# Altium footprint library Footprint-Lib-PhilsLab.PcbLib: 544 footprints (part 11 of 34)
Each footprint in its own frame and in the unit in brackets; x right, y up, seen from the top. Pads: shape width x height; smd on the part's side, far side on the other; paste and mask are expansions set on the pad; w line width, h text height; cw(c..) or ccw(c..) is an arc to the next point about the centre after c.
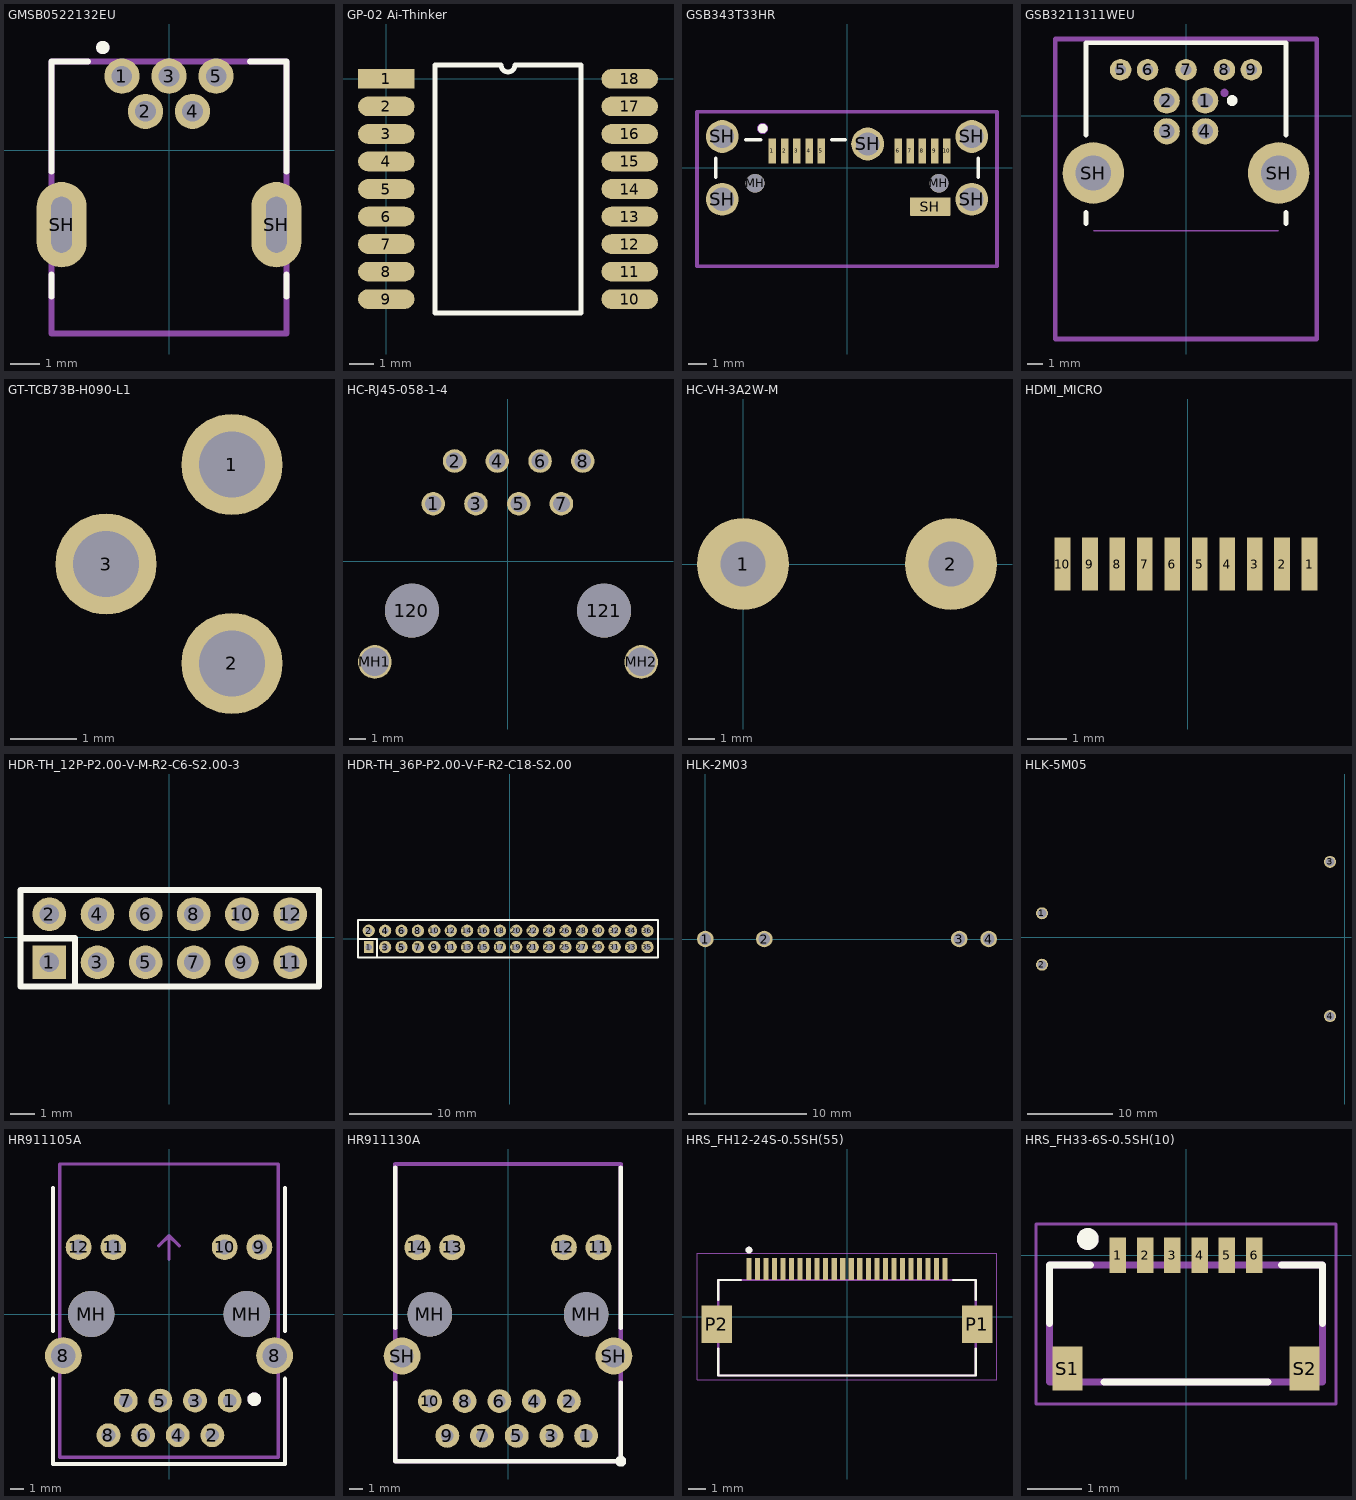
[diagram p10: the footprints below, top view; thin cyan lines are the x and y axes]

## GMSB0522132EU [mm]
pads (7):
  round 1.2 hole 0.7 mask+0.3: 1(-1.6,2.525) 2(-0.8,1.325) 3(0,2.525) 4(0.8,1.325) 5(1.6,2.525)
  oval 1.7x2.9 hole 0.7 slot 1.9 at 90 deg: SH(-3.65,-2.525) SH(3.65,-2.525)
Top Overlay:
  circle w0.25: c-2.25,3.5 r0.1
  lines w0.2: -4,-4.975 -4,-4.225 ; -4,-0.725 -4,3.025 -2.75,3.025 ; 2.75,3.025 4,3.025 4,-0.725 ; 4,-4.975 4,-4.225
Mechanical 13:
  circle w0.25: c-2.25,3.5 r0.1
  lines w0.2: -4,-6.225 -4,3.025 4,3.025 4,-6.225 -4,-6.225
  text "'.Designator'" at -5.665,-0.417 h1
3D body "GMSB0522132EU.stp": height 3.91, standoff -2.84, extent -3.95,-6.275 3.95,3.125

## GP-02 Ai-Thinker [mm]
pads (18):
  rect 2.3x0.8 smd: 1(0,0)
  oval 2.3x0.8 smd: 2(0,-1.12) 3(0,-2.24) 4(0,-3.36) 5(0,-4.48) 6(0,-5.6) 7(0,-6.72) 8(0,-7.84) 9(0,-8.96) 10(9.9,-8.96) 11(9.9,-7.84) 12(9.9,-6.72) 13(9.9,-5.6) 14(9.9,-4.48) 15(9.9,-3.36) 16(9.9,-2.24) 17(9.9,-1.12) 18(9.9,0)
Top Overlay:
  lines w0.2: 1.985,-9.52 7.915,-9.52 7.915,0.56 5.23,0.56 cw(c4.95,0.56) 4.67,0.56 1.985,0.56 1.985,-9.52

## GSB343T33HR [mm]
pads (18):
  rrect10% 0.4x1.35 smd: 1(-3.975,0.905) 2(-3.325,0.905) 3(-2.675,0.905) 4(-2.025,0.905) 5(-1.375,0.905) 6(2.725,0.905) 7(3.375,0.905) 8(4.025,0.905) 9(4.675,0.905) 10(5.325,0.905)
  round 1 hole 1 unplated: MH(-4.9,-0.825) MH(4.9,-0.825)
  round 1.75 hole 1.25: SH(-6.65,-1.675) SH(-6.65,1.675) SH(1.1,1.275) SH(6.65,-1.675) SH(6.65,1.675)
  rrect10% 2.18x0.98 smd: SH(4.44,-2.065)
Top Overlay:
  circle w0.3: c-4.5,2.1 r0.1
  lines w0.2: -7,-0.5 -7,0.5 ; -5.4,1.5 -4.6,1.5 ; -0.8,1.5 -0.1,1.5 ; 7,-0.5 7,0.5
Mechanical 13:
  circle w0.3: c-4.5,2.1 r0.141
  lines w0.2: -8,-5.25 -8,-1.75 -8,3 8,3 8,-5.25 -8,-5.25
  text "'.Designator'" at -5.665,-0.417 h1
3D body "gsb343t33hr.stp": height 5.5, standoff -0.75, extent -6.78,-5.078 6.77,2.175

## GSB3211311WEU [mm]
pads (11):
  round 1.7 hole 1: 1(1.25,1) 2(-1.25,1) 3(-1.25,-1) 4(1.25,-1)
  round 1.4 hole 0.7: 5(-4.25,3) 6(-2.5,3) 7(0,3) 8(2.5,3) 9(4.25,3)
  round 4 hole 2.3: SH(-6.02,-3.71) SH(6.02,-3.71)
Top Overlay:
  circle w0.5: c3,1 r0.1
  lines w0.3: -6.5,-7 -6.5,-6.25 ; -6.5,-1.25 -6.5,4.75 6.5,4.75 6.5,-1.25 ; 6.5,-7 6.5,-6.25
Mechanical 13:
  circle w0.3: c2.5,1.5 r0.118
  lines w0.12: -6,-7.46 6,-7.46
  lines w0.3: -8.5,-14.5 8.5,-14.5 8.5,5 -8.5,5 -8.5,-14.5
  text "PCB EDGE" at -2.032,-7.2 h0.5
  text "'.Designator'" at -5.815,-0.9 h1
3D body "gsb3211311weu.stp": height 13.13, standoff -4.09, extent -6.3,-13.95 6.3,4.4

## GT-TCB73B-H090-L1 [mm] "None Without bracket 50mA 4.5mm 100000 Times 12V 250gf 4.5mm 9mm Round Button Bend-in SPST Plugin Tactile Switches ROHS"
pads (3):
  round 1.524 hole 1: 1(-37.1,332.8) 2(-37.1,329.8) 3(-39,331.3)

## HC-RJ45-058-1-4 [mm] "RJ45Receptacle Shielded 1 Bend-in Tin Brass Without LED Plugin Ethernet Connectors / Modular Connectors (RJ45 RJ11) ROHS"
pads (12):
  round 1.4 hole 1: 1(-4.445,3.43) 2(-3.175,5.97) 3(-1.905,3.43) 4(-0.635,5.97) 5(0.635,3.43) 6(1.905,5.97) 7(3.175,3.43) 8(4.445,5.97)
  round 3.2 hole 3.2: 120(-5.715,-2.92) 121(5.715,-2.92)
  round 2 hole 1.7: MH1(-7.915,-5.97) MH2(7.915,-5.97)

## HC-VH-3A2W-M [mm] "1x3P (Missing 1P) 2P (3P Missing 1P) VH 1 Tin 7.92mm 3 -25?~+85? 7A Brass Bend-in Push-Pull,P=3.96mm Wire To Board Connector ROHS"
pads (2):
  round 3.5 hole 1.7: 1(0,0) 2(7.9,0)
3D body "AC connector.STEP": height 8.9, standoff -2.5, extent -1.77,-10.55 9.57,0.59

## HDMI_MICRO [mm]
pads (10):
  rect 0.4x1.35 smd: 1(3.1,9.6) 2(2.4,9.6) 3(1.7,9.6) 4(1,9.6) 5(0.3,9.6) 6(-0.4,9.6) 7(-1.1,9.6) 8(-1.8,9.6) 9(-2.5,9.6) 10(-3.2,9.6)
3D body "MicroHDMI-PCBMount.STEP": height 0.61, standoff -1.59, extent -4.3,-3.9 4.3,10

## HDR-TH_12P-P2.00-V-M-R2-C6-S2.00-3 [mm] "2mm 2mm Double Row Gold 12P 1kV -40?~+105? Straight 2x6P 6.35mm Top Square Hole Plugin,P=2mm Female Headers ROHS"
pads (12):
  rect 1.4x1.4 hole 0.8: 1(-4.979,-1.038)
  round 1.4 hole 0.8: 2(-4.979,0.962) 3(-2.979,-1.038) 4(-2.979,0.962) 5(-0.979,-1.038) 6(-0.979,0.962) 7(1.021,-1.038) 8(1.021,0.962) 9(3.021,-1.038) 10(3.021,0.962) 11(5.021,-1.038) 12(5.021,0.962)
Top Overlay:
  lines w0.254: -6.179,-0.038 -3.916,-0.038 -3.916,-2.038 ; -6.179,-2.038 -6.179,1.962 6.221,1.962 6.221,-2.038 -6.179,-2.038
Mechanical 15:
  region: 4.771,1.162 5.271,1.162 5.271,0.762 4.771,0.762
  region: 4.771,-0.838 5.271,-0.838 5.271,-1.238 4.771,-1.238
  region: 2.771,1.162 3.271,1.162 3.271,0.762 2.771,0.762
  region: 2.771,-0.838 3.271,-0.838 3.271,-1.238 2.771,-1.238
  region: 0.771,1.162 1.271,1.162 1.271,0.762 0.771,0.762
  region: 0.771,-0.838 1.271,-0.838 1.271,-1.238 0.771,-1.238
  region: -1.229,1.162 -0.729,1.162 -0.729,0.762 -1.229,0.762
  region: -1.229,-0.838 -0.729,-0.838 -0.729,-1.238 -1.229,-1.238
  region: -3.229,1.162 -2.729,1.162 -2.729,0.762 -3.229,0.762
  region: -3.229,-0.838 -2.729,-0.838 -2.729,-1.238 -3.229,-1.238
  region: -5.229,1.162 -4.729,1.162 -4.729,0.762 -5.229,0.762
  region: -5.229,-0.838 -4.729,-0.838 -4.729,-1.238 -5.229,-1.238
  region: -6.119,-2.038 -6.119,-2.013 -6.154,-1.978 -6.204,-1.978 -6.239,-2.013 -6.239,-2.038 -6.239,-2.063 -6.204,-2.098 -6.154,-2.098 -6.119,-2.063
  lines w0.051: -6.179,-2.038 6.221,-2.038 6.221,1.962 -6.179,1.962 -6.179,-2.038

## HDR-TH_36P-P2.00-V-F-R2-C18-S2.00 [mm] "2mm Double Row Straight 2x18P Plugin,P=2mm Female Headers ROHS"
pads (36):
  rect 1.2x1.5 hole 0.8: 1(-17.177,-1.006)
  round 1.5 hole 0.8: 2(-17.177,0.994) 3(-15.177,-1.006) 4(-15.177,0.994) 5(-13.177,-1.006) 6(-13.177,0.994) 7(-11.177,-1.006) 8(-11.177,0.994) 9(-9.177,-1.006) 10(-9.177,0.994) 11(-7.177,-1.006) 12(-7.177,0.994) 13(-5.177,-1.006) 14(-5.177,0.994) 15(-3.177,-1.006) 16(-3.177,0.994) 17(-1.177,-1.006) 18(-1.177,0.994) 19(0.823,-1.006) 20(0.823,0.994) 21(2.823,-1.006) 22(2.823,0.994) 23(4.823,-1.006) 24(4.823,0.994) 25(6.823,-1.006) 26(6.823,0.994) 27(8.823,-1.006) 28(8.823,0.994) 29(10.823,-1.006) 30(10.823,0.994) 31(12.823,-1.006) 32(12.823,0.994) 33(14.823,-1.006) 34(14.823,0.994) 35(16.823,-1.006) 36(16.823,0.994)
Top Overlay:
  lines w0.254: -18.465,-0.013 -16.177,-0.006 -16.177,-2.292 ; -18.465,-2.292 18.111,-2.292 18.111,2.28 -18.465,2.28 -18.465,-2.292
Mechanical 15:
  drawing of 41 lines, arcs and shapes, not listed

## HLK-2M03 [mm]
pads (4):
  round 1.4 hole 1: 1(0,0) 2(5,0) 3(21.5,0) 4(24,0)
3D body "Rectifier (2).STEP": height 19, standoff -5.2, extent -3.06,-8.1 27.06,8.1

## HLK-5M05 [mm] "Plugin AC-DC Power Modules ROHS"
pads (4):
  round 1.4 hole 1: 1(-35.3,2.8) 2(-35.3,-3.2) 3(-1.7,8.8) 4(-1.7,-9.2)
3D body "Hi link 5V.STEP": height 18, standoff -5, extent -37.4,-11.7 0.6,11.3

## HR911105A [mm]
pads (16):
  round 1.75 hole 1: 1(4.45,-6.35) 2(3.18,-8.89) 3(1.91,-6.35) 4(0.64,-8.89) 5(-0.63,-6.35) 6(-1.9,-8.89) 7(-3.17,-6.35) 8(-4.44,-8.89)
  round 2.7 hole 1.8: 8(-7.745,-3.05) 8(7.745,-3.05)
  round 1.9 hole 1.1: 9(6.625,4.9) 10(4.085,4.9) 11(-4.085,4.9) 12(-6.625,4.9)
  round 3.4 hole 3.4 unplated: MH(-5.715,0) MH(5.715,0)
Top Overlay:
  circle w0.5: c6.25,-6.25 r0.25
  lines w0.3: -8.5,-4.75 -8.5,-11 8.5,-11 8.5,-4.75 ; -8.5,-1.25 -8.5,9.25 ; 8.5,-1.25 8.5,9.25
Mechanical 13:
  circle w0.5: c6.25,-6.25 r0.25
  lines w0.254: -0.75,5 0,5.75 ; 0,4 0,5.75 ; 0.75,5 0,5.75 ; -8,-10.5 -8,11 8,11 8,-10.5 -8,-10.5
  text "'.Designator'" at -5.665,-0.417 h1
3D body "HR911105A.step": height 13.51, standoff -2.99, extent -7.93,-10.48 7.95,10.92

## HR911130A [mm]
pads (18):
  round 1.75 hole 0.9: 1(5.72,-8.89) 2(4.45,-6.35) 3(3.18,-8.89) 4(1.91,-6.35) 5(0.64,-8.89) 6(-0.63,-6.35) 7(-1.9,-8.89) 8(-3.17,-6.35) 9(-4.44,-8.89) 10(-5.71,-6.35)
  round 1.9 hole 1.05: 11(6.625,4.9) 12(4.085,4.9) 13(-4.085,4.9) 14(-6.625,4.9)
  round 3.25 hole 3.25 unplated: MH(-5.715,0) MH(5.715,0)
  round 2.7 hole 1.65: SH(-7.745,-3.05) SH(7.745,-3.05)
Top Overlay:
  circle w0.4: c8.25,-10.75 r0.2
  lines w0.3: -8.25,-5 -8.25,-10.75 8.25,-10.75 8.25,-5 ; -8.25,-1 -8.25,10.75 ; 8.25,-1 8.25,10.75
Mechanical 13:
  lines w0.3: -8.25,-10.75 8.25,-10.75 8.25,11 -8.25,11 -8.25,-10.75
  text "'.Designator'" at -5.665,-0.417 h1
  text "1" at 7.333,-9.5 h1
3D body "HR911130A.STEP": height 13.51, standoff -2.99, extent -7.94,-10.49 7.94,10.91

## HRS_FH12-24S-0.5SH(55) [mm]
height 2.2
pads (26):
  rect 0.3x1.3 smd paste-2 mask+0.102: 1(-5.75,2.8) 2(-5.25,2.8) 3(-4.75,2.8) 4(-4.25,2.8) 5(-3.75,2.8) 6(-3.25,2.8) 7(-2.75,2.8) 8(-2.25,2.8) 9(-1.75,2.8) 10(-1.25,2.8) 11(-0.75,2.8) 12(-0.25,2.8) 13(0.25,2.8) 14(0.75,2.8) 15(1.25,2.8) 16(1.75,2.8) 17(2.25,2.8) 18(2.75,2.8) 19(3.25,2.8) 20(3.75,2.8) 21(4.25,2.8) 22(4.75,2.8) 23(5.25,2.8) 24(5.75,2.8)
  rect 1.8x2.2 smd paste+0 mask+0.102: P1(7.65,-0.45) P2(-7.65,-0.45)
Top Overlay:
  circle w0.2: c-5.75,3.9 r0.1
  lines w0.127: -7.55,-1.87 -7.55,-3.45 7.55,-3.45 7.55,-1.87 ; -7.55,0.97 -7.55,2.15 -6.22,2.15 ; 6.22,2.15 7.55,2.15 7.55,0.97
Top Paste:
  region: 5.875,2.15 5.625,2.15 5.625,3.45 5.875,3.45
  region: 5.375,2.15 5.125,2.15 5.125,3.45 5.375,3.45
  region: 4.875,2.15 4.625,2.15 4.625,3.45 4.875,3.45
  region: 4.375,2.15 4.125,2.15 4.125,3.45 4.375,3.45
  region: 3.875,2.15 3.625,2.15 3.625,3.45 3.875,3.45
  region: 3.375,2.15 3.125,2.15 3.125,3.45 3.375,3.45
  region: 2.875,2.15 2.625,2.15 2.625,3.45 2.875,3.45
  region: 2.375,2.15 2.125,2.15 2.125,3.45 2.375,3.45
  region: 1.875,2.15 1.625,2.15 1.625,3.45 1.875,3.45
  region: 1.375,2.15 1.125,2.15 1.125,3.45 1.375,3.45
  region: 0.875,2.15 0.625,2.15 0.625,3.45 0.875,3.45
  region: 0.375,2.15 0.125,2.15 0.125,3.45 0.375,3.45
  region: -0.125,2.15 -0.375,2.15 -0.375,3.45 -0.125,3.45
  region: -0.625,2.15 -0.875,2.15 -0.875,3.45 -0.625,3.45
  region: -1.125,2.15 -1.375,2.15 -1.375,3.45 -1.125,3.45
  region: -1.625,2.15 -1.875,2.15 -1.875,3.45 -1.625,3.45
  region: -2.125,2.15 -2.375,2.15 -2.375,3.45 -2.125,3.45
  region: -2.625,2.15 -2.875,2.15 -2.875,3.45 -2.625,3.45
  region: -3.125,2.15 -3.375,2.15 -3.375,3.45 -3.125,3.45
  region: -3.625,2.15 -3.875,2.15 -3.875,3.45 -3.625,3.45
  region: -4.125,2.15 -4.375,2.15 -4.375,3.45 -4.125,3.45
  region: -4.625,2.15 -4.875,2.15 -4.875,3.45 -4.625,3.45
  region: -5.125,2.15 -5.375,2.15 -5.375,3.45 -5.125,3.45
  region: -5.625,2.15 -5.875,2.15 -5.875,3.45 -5.625,3.45
Mechanical 13:
  circle w0.2: c-5.75,3.9 r0.1
  lines w0.127: -7.55,-3.45 7.55,-3.45 7.55,2.15 -7.55,2.15 -7.55,-3.45
Mechanical 15:
  lines w0.05: -8.8,-3.7 8.8,-3.7 8.8,3.7 -8.8,3.7 -8.8,-3.7
3D body "step_temp.STEP": height 2.04, standoff -0.06, extent -8.05,-3.175 8.05,3.225

## HRS_FH33-6S-0.5SH(10) [mm]
pads (8):
  rect 0.3x0.65 smd paste-1 mask+0.102: 1(-1.25,0) 2(-0.75,0) 3(-0.25,0) 4(0.25,0) 5(0.75,0) 6(1.25,0)
  rect 0.55x0.8 smd paste+0 mask+0.102: S1(-2.175,-2.075) S2(2.175,-2.075)
Top Overlay:
  circle w0.2: c-1.8,0.3 r0.1
  lines w0.127: -2.5,-1.25 -2.5,-0.175 -1.75,-0.175 ; -1.5,-2.325 1.5,-2.325 ; 1.75,-0.175 2.5,-0.175 2.5,-1.25
Top Paste:
  region: -0.125,-0.325 -0.375,-0.325 -0.375,0.325 -0.125,0.325
  region: -0.625,-0.325 -0.875,-0.325 -0.875,0.325 -0.625,0.325
  region: -1.125,-0.325 -1.375,-0.325 -1.375,0.325 -1.125,0.325
  region: 0.375,-0.325 0.125,-0.325 0.125,0.325 0.375,0.325
  region: 0.875,-0.325 0.625,-0.325 0.625,0.325 0.875,0.325
  region: 1.375,-0.325 1.125,-0.325 1.125,0.325 1.375,0.325
Mechanical 13:
  circle w0.2: c-1.8,0.3 r0.1
  lines w0.127: -2.5,-2.325 2.5,-2.325 2.5,-0.175 -2.5,-0.175 -2.5,-2.325
Mechanical 15:
  lines w0.05: -2.75,-2.725 2.75,-2.725 2.75,0.575 -2.75,0.575 -2.75,-2.725